# Altium schematic symbol library 22272051.SchLib: 1 symbol
Pins are listed as number, name and electrical type; pins without a type are passive.

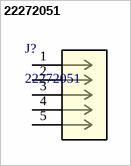
[diagram p0: symbol 22272051]

## 22272051
designator J?
KK 254 Wire-to-Board Header, Vertical, with Friction Lock, 5 Circuits, Tin (Sn) Plating; Manufacturer_Name: Molex Connector Corporation; Copyright: Copyright (C) 2025 Ultra Librarian. All rights reserved.; Manufacturer_Part_Number: 22272051; RefDes: RefDes; Type: Type
footprint CONN_AE-6410-05A_MOL
pins: 1, 2, 3, 4, 5